# Altium schematic symbol library TP4_COMPACT_FMC.SCHLIB: 26 symbols
Pins are listed as number, name and electrical type; pins without a type are passive.

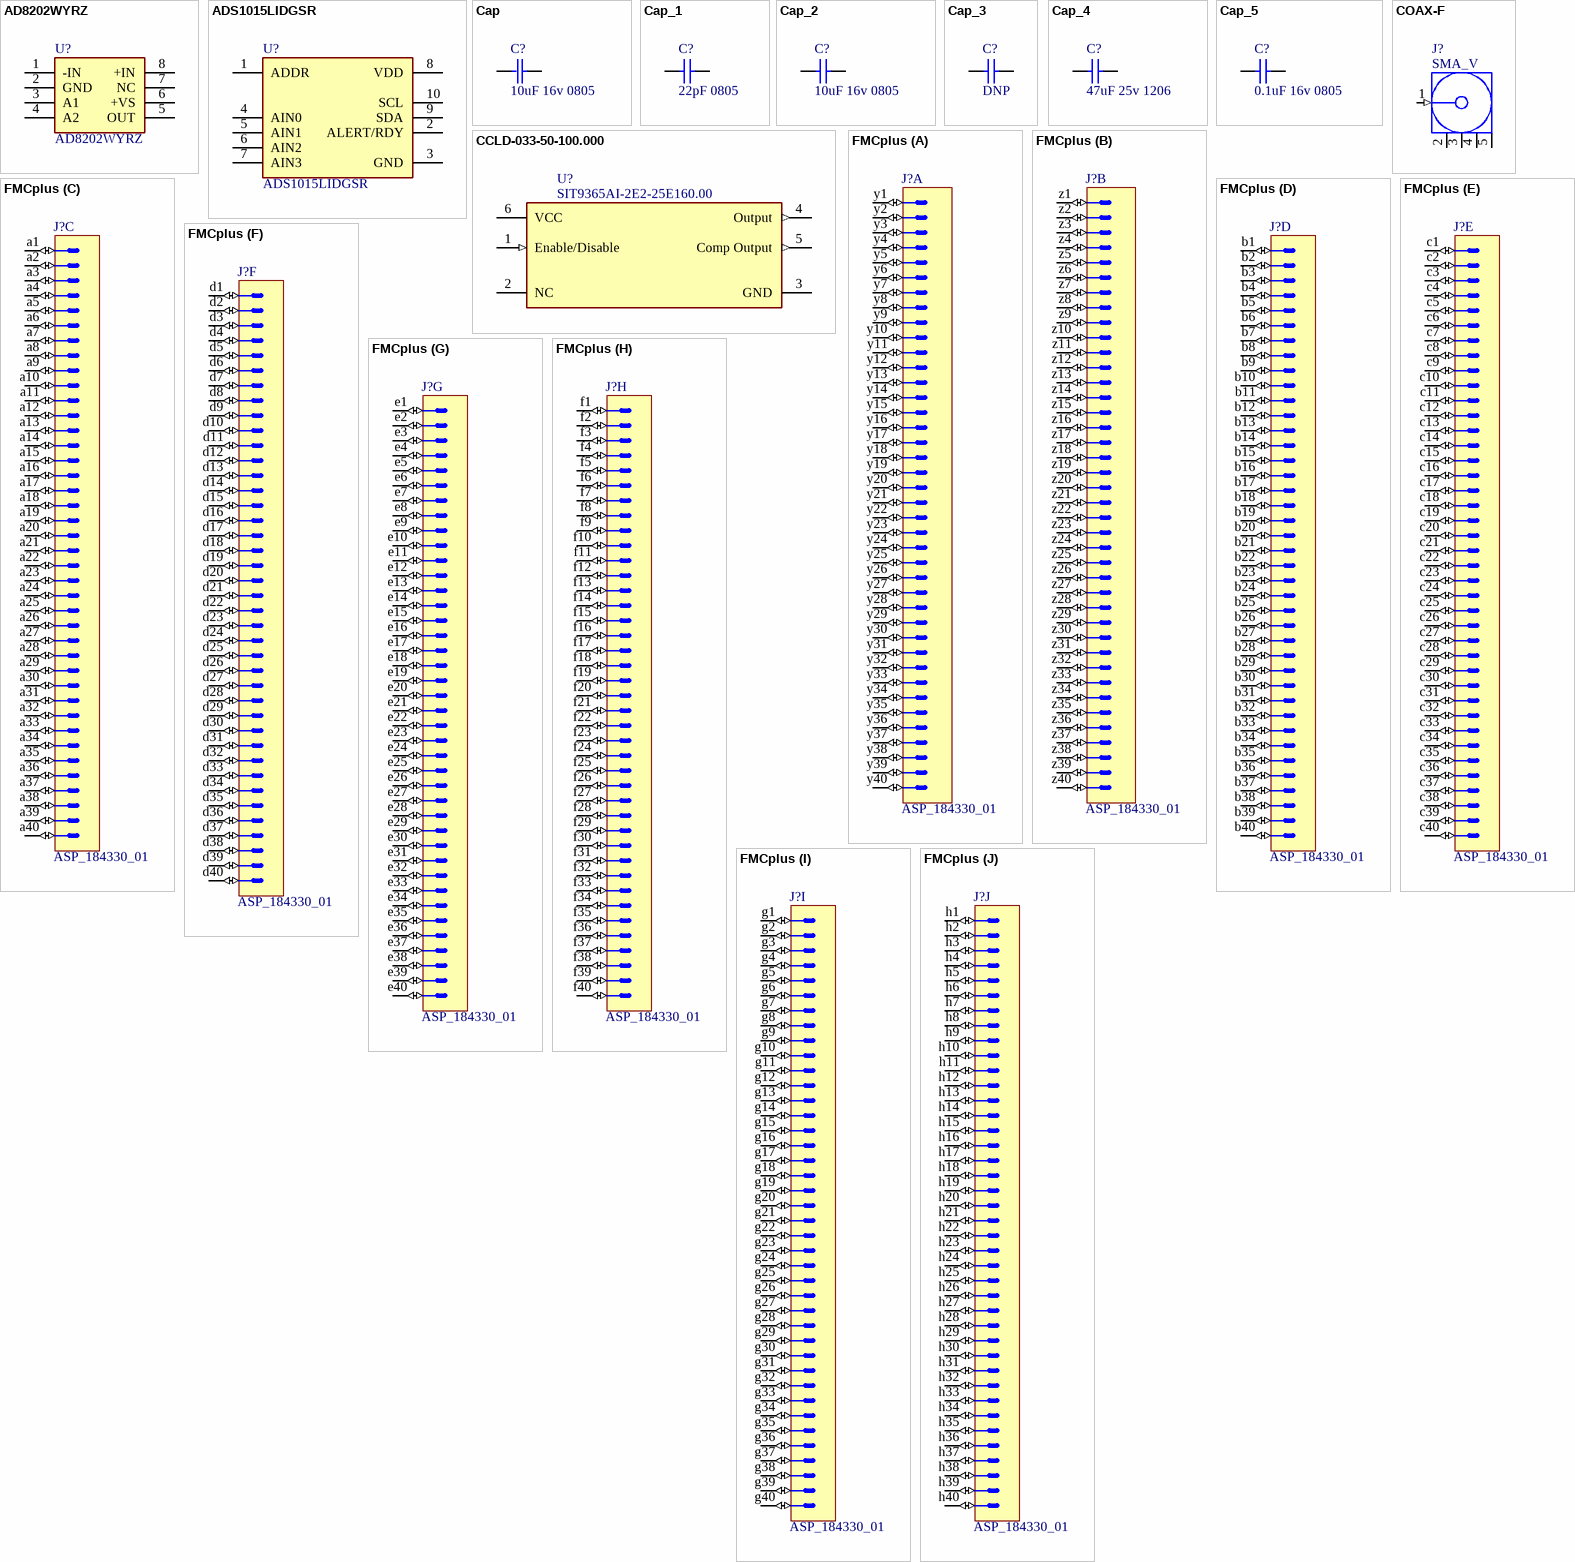
[diagram p0: symbols AD8202WYRZ to FMCplus]

## AD8202WYRZ
designator U?
Integrated Circuit; Manufacturer_Name: Analog Devices; OrderNo: AD8202YRZ-R7CT-ND; Datasheet Link: http://www.analog.com/static/imported-files/data_sheets/AD8202.pdf; Height: 1.75mm; Manufacturer_Part_Number: AD8202WYRZ; Mouser Part Number: 584-AD8202WYRZ; Mouser Price/Stock: https://www.mouser.com/Search/Refine.aspx?Keyword=584-AD8202WYRZ; Arrow Part Number: AD8202WYRZ; Arrow Price/Stock: https://www.arrow.com/en/products/ad8202wyrz/analog-devices?region=nac; Supplier: Digikey
footprint SOIC127P600X175-8N
footprint SOIC127P600X175-8N
pins: 1 -IN, 2 GND, 3 A1, 4 A2, 5 OUT, 6 +VS, 7 NC, 8 +IN

## ADS1015LIDGSR
designator U?
Integrated Circuit; Manufacturer_Name: Texas Instruments; Datasheet Link: https://www.ti.com/lit/ds/symlink/ads1015l.pdf?ts=1755949738915&ref_url=https%253A%252F%252Fwww.google.com%252F; Height: 1.1mm; Manufacturer_Part_Number: ADS1015LIDGSR; Mouser Part Number: 595-ADS1015LIDGSR; Mouser Price/Stock: https://www.mouser.co.uk/ProductDetail/Texas-Instruments/ADS1015LIDGSR?qs=2wMNvWM5ZX4Z9D3W5OO6Eg%3D%3D; Arrow Part Number: ADS1015LIDGSR; Arrow Price/Stock: https://www.arrow.com/en/products/ads1015lidgsr/texas-instruments?utm_currency=USD&region=nac
footprint SOP50P490X110-10N
pins: 1 ADDR, 2 ALERT/RDY, 3 GND, 4 AIN0, 5 AIN1, 6 AIN2, 7 AIN3, 8 VDD, 9 SDA, 10 SCL

## Cap
designator C?  value 10uF 16v 0805  (hidden comment: Cap)
Capacitor, ceramic SM; OrderNo: 1276-2872-1-ND; CostEach: 0; Supplier: Digikey
footprint CAP0805
pins: 1, 2

## Cap_1
designator C?, comment value 22pF 0805  (hidden comment: Cap)
Capacitor; OrderNo: 399-C0805C220J5GACTUCT-ND; Published: 8-Jun-2000; LatestRevisionDate: 17-Jul-2002; LatestRevisionNote: Re-released for DXP Platform.; PackageReference: RAD-0.3; Publisher: Altium Limited; PackageDescription: Radial Cap, Thru-Hole; 2 Leads; 0.3 in Pin Spacing
simulation model CAP (Capacitor)
signal-integrity model Cap
footprint CAP0805
pins: 1, 2

## Cap_2
designator C?, comment value 10uF 16v 0805  (hidden comment: Cap)
Capacitor; OrderNo: 1276-2872-1-ND; Published: 8-Jun-2000; LatestRevisionDate: 17-Jul-2002; LatestRevisionNote: Re-released for DXP Platform.; PackageReference: RAD-0.3; Publisher: Altium Limited; PackageDescription: Radial Cap, Thru-Hole; 2 Leads; 0.3 in Pin Spacing
simulation model CAP (Capacitor)
signal-integrity model Cap
footprint CAP0805
pins: 1, 2

## Cap_3
designator C?, comment value DNP  (hidden comment: Cap)
Capacitor; Published: 8-Jun-2000; LatestRevisionDate: 17-Jul-2002; LatestRevisionNote: Re-released for DXP Platform.; PackageReference: RAD-0.3; Publisher: Altium Limited; PackageDescription: Radial Cap, Thru-Hole; 2 Leads; 0.3 in Pin Spacing
simulation model CAP (Capacitor)
signal-integrity model Cap
footprint CAP0805
pins: 1, 2

## Cap_4
designator C?, comment value 47uF 25v 1206  (hidden comment: Cap)
Capacitor; OrderNo: 445-8047-1-ND; Published: 8-Jun-2000; LatestRevisionDate: 17-Jul-2002; LatestRevisionNote: Re-released for DXP Platform.; PackageReference: RAD-0.3; Publisher: Altium Limited; PackageDescription: Radial Cap, Thru-Hole; 2 Leads; 0.3 in Pin Spacing
simulation model CAP (Capacitor)
signal-integrity model Cap
footprint 1206 (Chip Capacitor; Body 3.2 x 1.6 mm (LxW typ))
pins: 1, 2

## Cap_5
designator C?, comment value 0.1uF 16v 0805  (hidden comment: Cap)
Capacitor; OrderNo: 399-C0805C104K4RACTUCT-ND; CostEach: 0; Published: 8-Jun-2000; LatestRevisionDate: 17-Jul-2002; LatestRevisionNote: Re-released for DXP Platform.; PackageReference: RAD-0.3; Publisher: Altium Limited; PackageDescription: Radial Cap, Thru-Hole; 2 Leads; 0.3 in Pin Spacing; Supplier: Digikey
simulation model CAP (Capacitor)
signal-integrity model Cap
footprint CAP0805
pins: 1, 2

## CCLD-033-50-100.000
designator U?, comment SIT9365AI-2E2-25E160.00
OrderNo: 1473-SIT9365AI-2E2-25E160.000000-ND; Supplier: Digikey
footprint osc_7mm_5mm
pins: 1 Enable/Disable (in), 2 NC, 3 GND (power), 4 Output (out), 5 Comp Output (out), 6 VCC (power)

## COAX-F
designator J?, comment SMA_V
Vertical mount SMA; PCB_Layout: Complies with manufacturer's recommendation.; DrillSize: Corresponds to nominal value.; OrderNo: SAM10718-ND; Published: 15-Jul-2004; LatestRevisionDate: 15-Jul-2004; LatestRevisionNote: Component Replaced.; DatasheetDocument: 30-May-2003; PackageDocument: 04-Jul-1999; PackageReference: 919-119J-51AX; Publisher: Altium Limited; ComponentLink1Description: Manufacturer Link; ComponentLink1URL: http://www.amphenolrf.com/
footprint MCX5.08-H5 (Connector; RF Coaxial, MCX, Thru-Hole; 5 Position; Right-Angle)
footprint SMA_Vert (SMA, Jack, SMT, Vertical)
pins: 1 Signal (in) "Signal Pin", 2 GND (power), 3 GND (power), 4 GND (power), 5 GND (power)

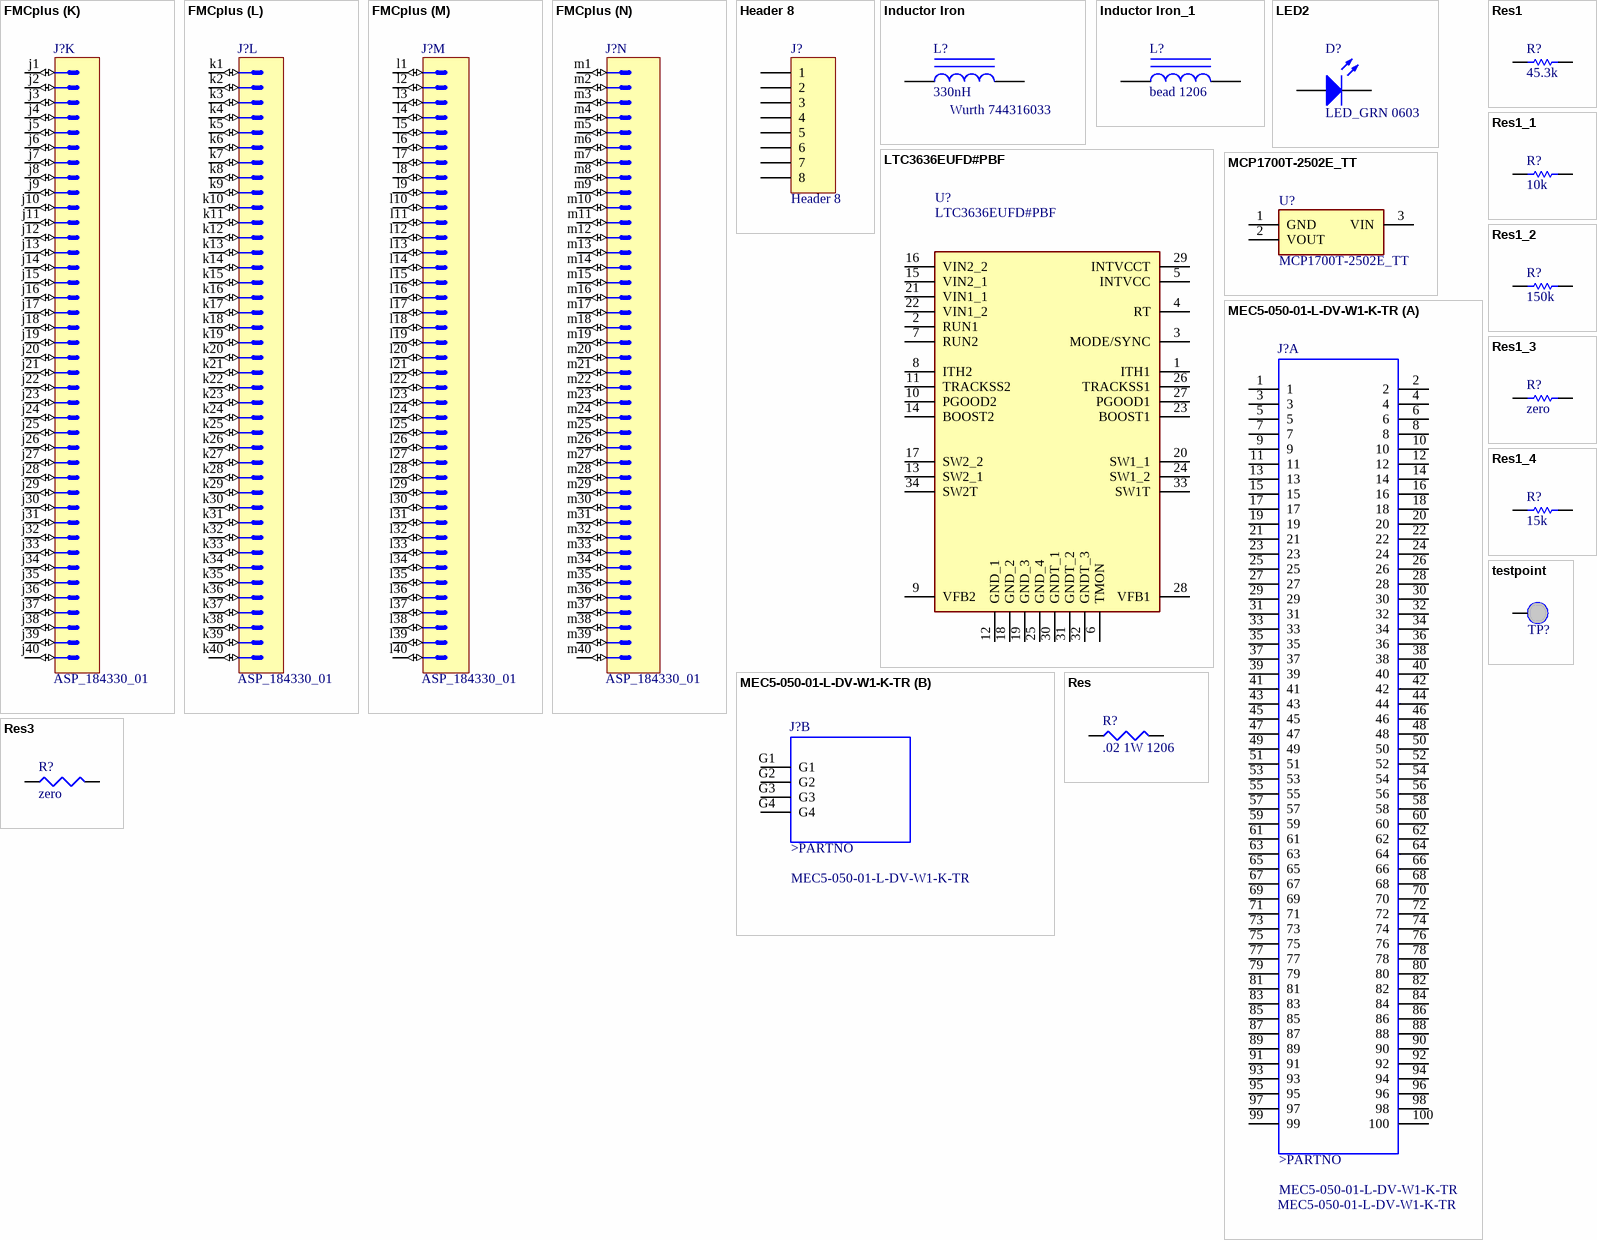
[diagram p1: symbols FMCplus to testpoint]

## FMCplus
designator J?, comment ASP_184330_01
CostEach: 0; OrderNo: SAM9173-ND; Supplier: Digikey
footprint SAMTEC_ASP_184330_01 (14 ROW .050 PITCH TERMINAL ARRAY ASM)
part A pins: y1 (io), y2 (io), y3 (io), y4 (io), y5 (io), y6 (io), y7 (io), y8 (io), y9 (io), y10 (io), y11 (io), y12 (io), y13 (io), y14 (io), y15 (io), y16 (io), y17 (io), y18 (io), y19 (io), y20 (io), y21 (io), y22 (io), y23 (io), y24 (io), y25 (io), y26 (io), y27 (io), y28 (io), y29 (io), y30 (io), y31 (io), y32 (io), y33 (io), y34 (io), y35 (io), y36 (io), y37 (io), y38 (io), y39 (io), y40 (io)
part B pins: z1 (io), z2 (io), z3 (io), z4 (io), z5 (io), z6 (io), z7 (io), z8 (io), z9 (io), z10 (io), z11 (io), z12 (io), z13 (io), z14 (io), z15 (io), z16 (io), z17 (io), z18 (io), z19 (io), z20 (io), z21 (io), z22 (io), z23 (io), z24 (io), z25 (io), z26 (io), z27 (io), z28 (io), z29 (io), z30 (io), z31 (io), z32 (io), z33 (io), z34 (io), z35 (io), z36 (io), z37 (io), z38 (io), z39 (io), z40 (io)
part C pins: a1 (io), a2 (io), a3 (io), a4 (io), a5 (io), a6 (io), a7 (io), a8 (io), a9 (io), a10 (io), a11 (io), a12 (io), a13 (io), a14 (io), a15 (io), a16 (io), a17 (io), a18 (io), a19 (io), a20 (io), a21 (io), a22 (io), a23 (io), a24 (io), a25 (io), a26 (io), a27 (io), a28 (io), a29 (io), a30 (io), a31 (io), a32 (io), a33 (io), a34 (io), a35 (io), a36 (io), a37 (io), a38 (io), a39 (io), a40 (io)
part D pins: b1 (io), b2 (io), b3 (io), b4 (io), b5 (io), b6 (io), b7 (io), b8 (io), b9 (io), b10 (io), b11 (io), b12 (io), b13 (io), b14 (io), b15 (io), b16 (io), b17 (io), b18 (io), b19 (io), b20 (io), b21 (io), b22 (io), b23 (io), b24 (io), b25 (io), b26 (io), b27 (io), b28 (io), b29 (io), b30 (io), b31 (io), b32 (io), b33 (io), b34 (io), b35 (io), b36 (io), b37 (io), b38 (io), b39 (io), b40 (io)
part E pins: c1 (io), c2 (io), c3 (io), c4 (io), c5 (io), c6 (io), c7 (io), c8 (io), c9 (io), c10 (io), c11 (io), c12 (io), c13 (io), c14 (io), c15 (io), c16 (io), c17 (io), c18 (io), c19 (io), c20 (io), c21 (io), c22 (io), c23 (io), c24 (io), c25 (io), c26 (io), c27 (io), c28 (io), c29 (io), c30 (io), c31 (io), c32 (io), c33 (io), c34 (io), c35 (io), c36 (io), c37 (io), c38 (io), c39 (io), c40 (io)
part F pins: d1 (io), d2 (io), d3 (io), d4 (io), d5 (io), d6 (io), d7 (io), d8 (io), d9 (io), d10 (io), d11 (io), d12 (io), d13 (io), d14 (io), d15 (io), d16 (io), d17 (io), d18 (io), d19 (io), d20 (io), d21 (io), d22 (io), d23 (io), d24 (io), d25 (io), d26 (io), d27 (io), d28 (io), d29 (io), d30 (io), d31 (io), d32 (io), d33 (io), d34 (io), d35 (io), d36 (io), d37 (io), d38 (io), d39 (io), d40 (io)
part G pins: e1 (io), e2 (io), e3 (io), e4 (io), e5 (io), e6 (io), e7 (io), e8 (io), e9 (io), e10 (io), e11 (io), e12 (io), e13 (io), e14 (io), e15 (io), e16 (io), e17 (io), e18 (io), e19 (io), e20 (io), e21 (io), e22 (io), e23 (io), e24 (io), e25 (io), e26 (io), e27 (io), e28 (io), e29 (io), e30 (io), e31 (io), e32 (io), e33 (io), e34 (io), e35 (io), e36 (io), e37 (io), e38 (io), e39 (io), e40 (io)
part H pins: f1 (io), f2 (io), f3 (io), f4 (io), f5 (io), f6 (io), f7 (io), f8 (io), f9 (io), f10 (io), f11 (io), f12 (io), f13 (io), f14 (io), f15 (io), f16 (io), f17 (io), f18 (io), f19 (io), f20 (io), f21 (io), f22 (io), f23 (io), f24 (io), f25 (io), f26 (io), f27 (io), f28 (io), f29 (io), f30 (io), f31 (io), f32 (io), f33 (io), f34 (io), f35 (io), f36 (io), f37 (io), f38 (io), f39 (io), f40 (io)
part I pins: g1 (io), g2 (io), g3 (io), g4 (io), g5 (io), g6 (io), g7 (io), g8 (io), g9 (io), g10 (io), g11 (io), g12 (io), g13 (io), g14 (io), g15 (io), g16 (io), g17 (io), g18 (io), g19 (io), g20 (io), g21 (io), g22 (io), g23 (io), g24 (io), g25 (io), g26 (io), g27 (io), g28 (io), g29 (io), g30 (io), g31 (io), g32 (io), g33 (io), g34 (io), g35 (io), g36 (io), g37 (io), g38 (io), g39 (io), g40 (io)
part J pins: h1 (io), h2 (io), h3 (io), h4 (io), h5 (io), h6 (io), h7 (io), h8 (io), h9 (io), h10 (io), h11 (io), h12 (io), h13 (io), h14 (io), h15 (io), h16 (io), h17 (io), h18 (io), h19 (io), h20 (io), h21 (io), h22 (io), h23 (io), h24 (io), h25 (io), h26 (io), h27 (io), h28 (io), h29 (io), h30 (io), h31 (io), h32 (io), h33 (io), h34 (io), h35 (io), h36 (io), h37 (io), h38 (io), h39 (io), h40 (io)
part K pins: j1 (io), j2 (io), j3 (io), j4 (io), j5 (io), j6 (io), j7 (io), j8 (io), j9 (io), j10 (io), j11 (io), j12 (io), j13 (io), j14 (io), j15 (io), j16 (io), j17 (io), j18 (io), j19 (io), j20 (io), j21 (io), j22 (io), j23 (io), j24 (io), j25 (io), j26 (io), j27 (io), j28 (io), j29 (io), j30 (io), j31 (io), j32 (io), j33 (io), j34 (io), j35 (io), j36 (io), j37 (io), j38 (io), j39 (io), j40 (io)
part L pins: k1 (io), k2 (io), k3 (io), k4 (io), k5 (io), k6 (io), k7 (io), k8 (io), k9 (io), k10 (io), k11 (io), k12 (io), k13 (io), k14 (io), k15 (io), k16 (io), k17 (io), k18 (io), k19 (io), k20 (io), k21 (io), k22 (io), k23 (io), k24 (io), k25 (io), k26 (io), k27 (io), k28 (io), k29 (io), k30 (io), k31 (io), k32 (io), k33 (io), k34 (io), k35 (io), k36 (io), k37 (io), k38 (io), k39 (io), k40 (io)
part M pins: l1 (io), l2 (io), l3 (io), l4 (io), l5 (io), l6 (io), l7 (io), l8 (io), l9 (io), l10 (io), l11 (io), l12 (io), l13 (io), l14 (io), l15 (io), l16 (io), l17 (io), l18 (io), l19 (io), l20 (io), l21 (io), l22 (io), l23 (io), l24 (io), l25 (io), l26 (io), l27 (io), l28 (io), l29 (io), l30 (io), l31 (io), l32 (io), l33 (io), l34 (io), l35 (io), l36 (io), l37 (io), l38 (io), l39 (io), l40 (io)
part N pins: m1 (io), m2 (io), m3 (io), m4 (io), m5 (io), m6 (io), m7 (io), m8 (io), m9 (io), m10 (io), m11 (io), m12 (io), m13 (io), m14 (io), m15 (io), m16 (io), m17 (io), m18 (io), m19 (io), m20 (io), m21 (io), m22 (io), m23 (io), m24 (io), m25 (io), m26 (io), m27 (io), m28 (io), m29 (io), m30 (io), m31 (io), m32 (io), m33 (io), m34 (io), m35 (io), m36 (io), m37 (io), m38 (io), m39 (io), m40 (io)

## Header 8
designator J?
Header, 8-Pin; LatestRevisionDate: 17-Jul-2002; LatestRevisionNote: Re-released for DXP Platform.; Publisher: Altium Limited
footprint HDR1X8 (Connector; Header; 8 Position)
signal-integrity model Connector
pins: 1, 2, 3, 4, 5, 6, 7, 8

## Inductor Iron
designator L?, comment Wurth 744316033  value 330nH
Magnetic-Core Inductor; OrderNo: DK 732-6173-1-ND; Published: 24-Mar-1999; LatestRevisionDate: 17-Jul-2002; LatestRevisionNote: Re-released for DXP Platform.; PackageReference: AXIAL-0.9; Publisher: Altium Limited; PackageDescription: Axial Device, Thru-Hole; 2 Leads; 0.9 in Pin Spacing
simulation model INDUCTOR (Inductor)
signal-integrity model Inductor Iron
footprint Inductor_5.6mm
pins: 1, 2

## Inductor Iron_1
designator L?, comment value bead 1206  (hidden comment: Inductor Iron)
Magnetic-Core Inductor; Published: 24-Mar-1999; LatestRevisionDate: 17-Jul-2002; LatestRevisionNote: Re-released for DXP Platform.; PackageReference: AXIAL-0.9; Publisher: Altium Limited; PackageDescription: Axial Device, Thru-Hole; 2 Leads; 0.9 in Pin Spacing
simulation model INDUCTOR (Inductor)
signal-integrity model Inductor Iron
footprint 1206 (Chip Capacitor; Body 3.2 x 1.6 mm (LxW typ))
pins: 1, 2

## LED2
designator D?, comment LED_GRN 0603
Red LED, SM; EM_PN: L62301CT-ND; OrderNo: L62305CT-ND; Supplier: Digikey
simulation model LED2 (Diode)
footprint LED0603
pins: 1 A, 2 K

## LTC3636EUFD#PBF
designator U?
Integrated Circuit; Manufacturer_Name: Analog Devices; Datasheet Link: https://www.arrow.com/en/products/ltc3636eufdpbf/analog-devices; Height: 0.8mm; Manufacturer_Part_Number: LTC3636EUFD#PBF; Mouser Part Number: 584-LTC3636EUFDPBF; Mouser Price/Stock: https://www.mouser.co.uk/ProductDetail/Analog-Devices/LTC3636EUFDPBF?qs=BZBei1rCqCAF%252BjKW6tHubg%3D%3D; Arrow Part Number: LTC3636EUFD#PBF; Arrow Price/Stock: https://www.arrow.com/en/products/ltc3636eufdpbf/analog-devices?region=nac
footprint LTC3636EUFDPBF
pins: 1 ITH1, 2 RUN1, 3 MODE/SYNC, 4 RT, 5 INTVCC, 6 TMON, 7 RUN2, 8 ITH2, 9 VFB2, 10 PGOOD2, 11 TRACKSS2, 12 GND_1, 13 SW2_1, 14 BOOST2, 15 VIN2_1, 16 VIN2_2, 17 SW2_2, 18 GND_2, 19 GND_3, 20 SW1_1, 21 VIN1_1, 22 VIN1_2, 23 BOOST1, 24 SW1_2, 25 GND_4, 26 TRACKSS1, 27 PGOOD1, 28 VFB1, 29 INTVCCT, 30 GNDT_1, 31 GNDT_2, 32 GNDT_3, 33 SW1T, 34 SW2T

## MCP1700T-2502E_TT
designator U?
Integrated Circuit; Manufacturer_Name: Microchip; Manufacturer_Part_Number: MCP1700T-2502E/TT; OrderNo: MCP1700T-2502E/TTCT-ND; Datasheet Link: https://datasheet.datasheetarchive.com/originals/distributors/Datasheets-DGA25/1767215.pdf; Height: 1.12mm; Mouser Part Number: 579-MCP1700T2502E/TT; Mouser Price/Stock: https://www.mouser.co.uk/ProductDetail/Microchip-Technology/MCP1700T-2502E-TT?qs=fM4xO01eazNo%2FPEFFkh6Nw%3D%3D; Arrow Part Number: MCP1700T-2502E/TT; Arrow Price/Stock: https://www.arrow.com/en/products/mcp1700t-2502ett/microchip-technology?utm_currency=USD&region=nac
footprint SOT95P237X112-3N
pins: 1 GND, 2 VOUT, 3 VIN

## MEC5-050-01-L-DV-W1-K-TR
designator J?
MF: Samtec; Package: None; MP: MEC5-050-01-L-DV-W1-K-TR; Value: *; Availability: Unavailable; Price: None
footprint MEC5-050-01-L-DV-W1-K-TR
part A pins: 1, 2, 3, 4, 5, 6, 7, 8, 9, 10, 11, 12, 13, 14, 15, 16, 17, 18, 19, 20, 21, 22, 23, 24, 25, 26, 27, 28, 29, 30, 31, 32, 33, 34, 35, 36, 37, 38, 39, 40, 41, 42, 43, 44, 45, 46, 47, 48, 49, 50, 51, 52, 53, 54, 55, 56, 57, 58, 59, 60, 61, 62, 63, 64, 65, 66, 67, 68, 69, 70, 71, 72, 73, 74, 75, 76, 77, 78, 79, 80, 81, 82, 83, 84, 85, 86, 87, 88, 89, 90, 91, 92, 93, 94, 95, 96, 97, 98, 99, 100
part B pins: G1 (power), G2 (power), G3 (power), G4 (power)
part A text: >PARTNO
part B text: >PARTNO

## Res
designator R?  value .02 1W 1206  (hidden comment: Res)
Resistor, SM; OrderNo: RHM.003ALCT-ND; CostEach: 0; Supplier: Digikey
simulation model RESISTOR (Resistor)
signal-integrity model Res
footprint CAP0805
pins: 1, 2

## Res1
designator R?  value 45.3k  (hidden comment: Res1)
Resistor; Published: 8-Jun-2000; LatestRevisionDate: 17-Jul-2002; LatestRevisionNote: Re-released for DXP Platform.; PackageReference: AXIAL-0.3; Publisher: Altium Limited; PackageDescription: Axial Device, Thru-Hole; 2 Leads; 0.3 in Pin Spacing
simulation model RESISTOR (Resistor)
signal-integrity model Res
footprint CAP0805
pins: 1, 2

## Res1_1
designator R?, comment value 10k  (hidden comment: Res1)
Resistor; Published: 8-Jun-2000; LatestRevisionDate: 17-Jul-2002; LatestRevisionNote: Re-released for DXP Platform.; PackageReference: AXIAL-0.3; Publisher: Altium Limited; PackageDescription: Axial Device, Thru-Hole; 2 Leads; 0.3 in Pin Spacing
simulation model RESISTOR (Resistor)
signal-integrity model Res
footprint CAP0805
pins: 1, 2

## Res1_2
designator R?, comment value 150k  (hidden comment: Res1)
Resistor; Published: 8-Jun-2000; LatestRevisionDate: 17-Jul-2002; LatestRevisionNote: Re-released for DXP Platform.; PackageReference: AXIAL-0.3; Publisher: Altium Limited; PackageDescription: Axial Device, Thru-Hole; 2 Leads; 0.3 in Pin Spacing
simulation model RESISTOR (Resistor)
signal-integrity model Res
footprint CAP0805
pins: 1, 2

## Res1_3
designator R?, comment value zero  (hidden comment: Res1)
Resistor; Published: 8-Jun-2000; LatestRevisionDate: 17-Jul-2002; LatestRevisionNote: Re-released for DXP Platform.; PackageReference: AXIAL-0.3; Publisher: Altium Limited; PackageDescription: Axial Device, Thru-Hole; 2 Leads; 0.3 in Pin Spacing
simulation model RESISTOR (Resistor)
signal-integrity model Res
footprint CAP0805
pins: 1, 2

## Res1_4
designator R?, comment value 15k  (hidden comment: Res1)
Resistor; Published: 8-Jun-2000; LatestRevisionDate: 17-Jul-2002; LatestRevisionNote: Re-released for DXP Platform.; PackageReference: AXIAL-0.3; Publisher: Altium Limited; PackageDescription: Axial Device, Thru-Hole; 2 Leads; 0.3 in Pin Spacing
simulation model RESISTOR (Resistor)
signal-integrity model Res
footprint CAP0805
pins: 1, 2

## Res3
designator R?, comment value zero  (hidden comment: Res)
Resistor; OrderNo: P0.0GCT; CostEach: 0; Published: 8-Jun-2000; LatestRevisionDate: 29-May-2009; LatestRevisionNote: IPC-7351 Footprint Added.; PackageReference: J1-0603; Publisher: Altium Limited; PackageDescription: Chip Resistor; Supplier: Digikey
simulation model RESISTOR (Resistor)
signal-integrity model Res
footprint CAP0805
pins: 1, 2

## testpoint
designator TP?, comment through-hole pad  (value not drawn)
EM_PN: DNP; Supplier: Digikey
footprint Pin1 (Generic Antenna; 1 Lead)
pins: 1